# Altium schematic symbol library M41T82ZM6F.SchLib: 1 symbol
Pins are listed as number, name and electrical type; pins without a type are passive.

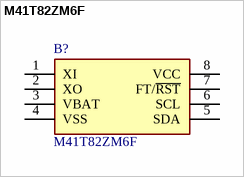
[diagram p0: symbol M41T82ZM6F]

## M41T82ZM6F
designator B?
M41T82ZM6F, Real Time Clock, Alarm, Calendar, Clock, 32B RAM, I2C, 2.38 to 5.5V, 8-Pin SOIC; Manufacturer_Name: STMicroelectronics; Geometry.Height: 1.75mm; Mouser Part Number: 511-M41T82ZM6F; Mouser Price/Stock: https://www.mouser.co.uk/ProductDetail/STMicroelectronics/M41T82ZM6F?qs=9fArFXnEOlK%2FxcsT9Q7OUQ%3D%3D; Manufacturer_Part_Number: M41T82ZM6F; Datasheet Link: https://www.st.com/resource/en/datasheet/m41t82.pdf
footprint SOIC127P600X175-8N
pins: 1 XI, 2 XO, 3 VBAT, 4 VSS, 5 SDA, 6 SCL, 7 FT/~{RST}, 8 VCC